# Altium integrated library EEU-FR1A471.IntLib: 1 symbol
Pins are listed as number, name and electrical type; pins without a type are passive.

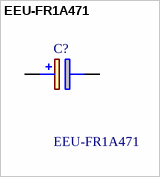
[diagram p0: symbol EEU-FR1A471]

## EEU-FR1A471
designator C?
Aluminium Electrolytic Capacitor, Radial Lead Type, 105C,  470UF 20% 10V RADIAL TH; Manufacturer_Name: Panasonic; Geometry.Height: 13mm; Manufacturer_Part_Number: EEU-FR1A471; Mouser Part Number: 667-EEU-FR1A471; Mouser Price/Stock: https://www.mouser.co.uk/ProductDetail/Panasonic/EEU-FR1A471?qs=tfZGHB2PWd0zwvBgXk6r8A%3D%3D; Arrow Part Number: EEU-FR1A471; Arrow Price/Stock: https://www.arrow.com/en/products/eeufr1a471_1/panasonic.html?utm_currency=USD&region=nac; Datasheet Link: http://industrial.panasonic.com/cdbs/www-data/pdf/RDF0000/ABA0000C1259.pdf
footprint CAPPRD350W65D800H1300
pins: 1 +, 2 -